# Altium schematic symbol library Crystal OSC.SchLib: 20 symbols
Pins are listed as number, name and electrical type; pins without a type are passive.

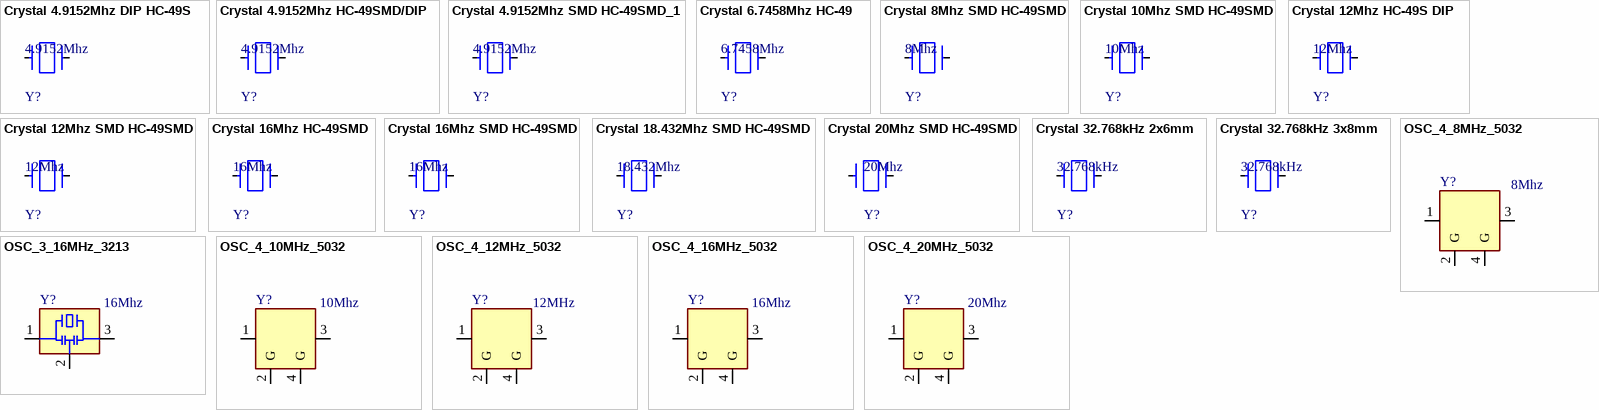
[diagram p0: symbols Crystal 4.9152Mhz DIP HC-49S to OSC_4_20MHz_5032]

## Crystal 4.9152Mhz DIP HC-49S
designator Y?, comment 4.9152Mhz
2 PIN HC-49 11.5 x 4.8 x 3.8mm; Code: 2501-005
footprint XTLT_2 (Crystal PTH HC49S)
pins: 1, 2

## Crystal 4.9152Mhz HC-49SMD/DIP
designator Y?, comment 4.9152Mhz
2 PIN HC-49SMD or HC49S / 11.5 x 4.8 x 3.8mm; Code: 2502-006 or 2501-005
footprint XTL_2_TH_SMD (Crystal PTH HC49S)
pins: 1, 2

## Crystal 4.9152Mhz SMD HC-49SMD_1
designator Y?, comment 4.9152Mhz
2 PIN HC-49SMD / 11.5 x 4.8 x 3.8mm; Code: 2502-006
footprint XTL_2_11X5 (SMD crystal resonator, ABL, ABLS, HC-49, HC49 11X4.5MM)
pins: 1, 2

## Crystal 6.7458Mhz HC-49
designator Y?, comment 6.7458Mhz
2 PIN HC-49 11.5 x 4.8 x 3.8mm; Designed by: Nhox; Code: N/A
footprint XTLT_2 (Crystal PTH HC49S)
pins: 1, 2

## Crystal 8Mhz SMD HC-49SMD
designator Y?, comment 8Mhz
2 PIN HC-49SMD / 11.5 x 4.8 x 3.8mm; Code: 2502-008
footprint XTL_2_11X5 (SMD crystal resonator, ABL, ABLS, HC-49, HC49 11X4.5MM)
pins: 1, 2

## Crystal 10Mhz SMD HC-49SMD
designator Y?, comment 10Mhz
2 PIN HC-49SMD / 11.5 x 4.8 x 3.8mm; Code: 2502-009
footprint XTL_2_11X5 (SMD crystal resonator, ABL, ABLS, HC-49, HC49 11X4.5MM)
pins: 1, 2

## Crystal 12Mhz HC-49S DIP
designator Y?, comment 12Mhz
2 PIN HC-49S / 11.5 x 4.8 x 3.8mm; Code: 2501-012
footprint XTLT_2 (Crystal PTH HC49S)
pins: 1, 2

## Crystal 12Mhz SMD HC-49SMD
designator Y?, comment 12Mhz
2 PIN HC-49SMD / 11.5 x 4.8 x 3.8mm; Code: 2502-011
footprint XTL_2_11X5 (SMD crystal resonator, ABL, ABLS, HC-49, HC49 11X4.5MM)
pins: 1, 2

## Crystal 16Mhz HC-49SMD
designator Y?, comment 16Mhz
2 PIN HC-49SMD / 11.5 x 4.8 x 3.8mm; Code: 2501-018
footprint XTLT_2 (Crystal PTH HC49S)
pins: 1, 2

## Crystal 16Mhz SMD HC-49SMD
designator Y?, comment 16Mhz
2 PIN HC-49SMD / 11.5 x 4.8 x 3.8mm; Code: 2502-017
footprint XTL_2_11X5 (SMD crystal resonator, ABL, ABLS, HC-49, HC49 11X4.5MM)
pins: 1, 2

## Crystal 18.432Mhz SMD HC-49SMD
designator Y?, comment 18.432Mhz
2 PIN HC-49SMD / 11.5 x 4.8 x 3.8mm; Code: 2502-020
footprint XTL_2_11X5 (SMD crystal resonator, ABL, ABLS, HC-49, HC49 11X4.5MM)
pins: 1, 2

## Crystal 20Mhz SMD HC-49SMD
designator Y?, comment 20Mhz
2 PIN HC-49SMD / 11.5 x 4.8 x 3.8mm; Code: 2502-021
footprint XTL_2_11X5 (SMD crystal resonator, ABL, ABLS, HC-49, HC49 11X4.5MM)
pins: 1, 2

## Crystal 32.768kHz 2x6mm
designator Y?, comment 32.768kHz
32.768kHz ±20ppm D: 2.0mm x L: 6.0 mm; Code: 2503-006
footprint XTLT_RTC (CRYSTAL RTC SLEEP, AB26T)
pins: 1, 2

## Crystal 32.768kHz 3x8mm
designator Y?, comment 32.768kHz
32.768kHz ±20ppm D: 3.0mm x L: 8.3 mm; Code: 2503-002
footprint XT32k 3x8mm
pins: 1, 2

## OSC_3_16MHz_3213
designator Y?, comment 16Mhz
CLOCK OSCILLATOR, 16Mhz, 3213; Designed by: Nhox; Code: N/A; Value: 16Mhz
footprint XTL_3_3213 (Crystal resonator CSTCE 3-lead 3.2 mm x 1.3 mm)
pins: 1 I, 2 G, 3 O

## OSC_4_8MHz_5032
designator Y?, comment 8Mhz
CLOCK OSCILLATOR, Crystal 5032 5 x 3.2 x 0.8mm; Code: 2506-033; Designed by: TranLuyen
footprint XTL_4_5032 (ASFLMB, CDFN-4)
pins: 1 I, 2 G, 3 O, 4 G

## OSC_4_10MHz_5032
designator Y?, comment 10Mhz
CLOCK OSCILLATOR, Crystal 5032 5 x 3.2 x 0.8mm; Code: 2506-018; Designed by: TranLuyen
footprint XTL_4_5032 (ASFLMB, CDFN-4)
pins: 1 I, 2 G, 3 O, 4 G

## OSC_4_12MHz_5032
designator Y?, comment 12MHz
CLOCK OSCILLATOR, Crystal 5032 5 x 3.2 x 0.8mm; Code: 2506-019; Designed by: TranLuyen
footprint XTL_4_5032 (ASFLMB, CDFN-4)
pins: 1 I, 2 G, 3 O, 4 G

## OSC_4_16MHz_5032
designator Y?, comment 16Mhz
CLOCK OSCILLATOR, Crystal 5032 5 x 3.2 x 0.8mm; Code: 2506-021; Designed by: TranLuyen
footprint XTL_4_5032 (ASFLMB, CDFN-4)
pins: 1 I, 2 G, 3 O, 4 G

## OSC_4_20MHz_5032
designator Y?, comment 20Mhz
CLOCK OSCILLATOR, Crystal 5032 5 x 3.2 x 0.8mm; Code: 2506-022; Designed by: TranLuyen
footprint XTL_4_5032 (ASFLMB, CDFN-4)
pins: 1 I, 2 G, 3 O, 4 G